# Altium footprint library Connectors.PcbLib: 63 footprints (part 2 of 4)
Each footprint in its own frame and in the unit in brackets; x right, y up, seen from the top. Pads: shape width x height; smd on the part's side, far side on the other; paste and mask are expansions set on the pad; w line width, h text height; cw(c..) or ccw(c..) is an arc to the next point about the centre after c.
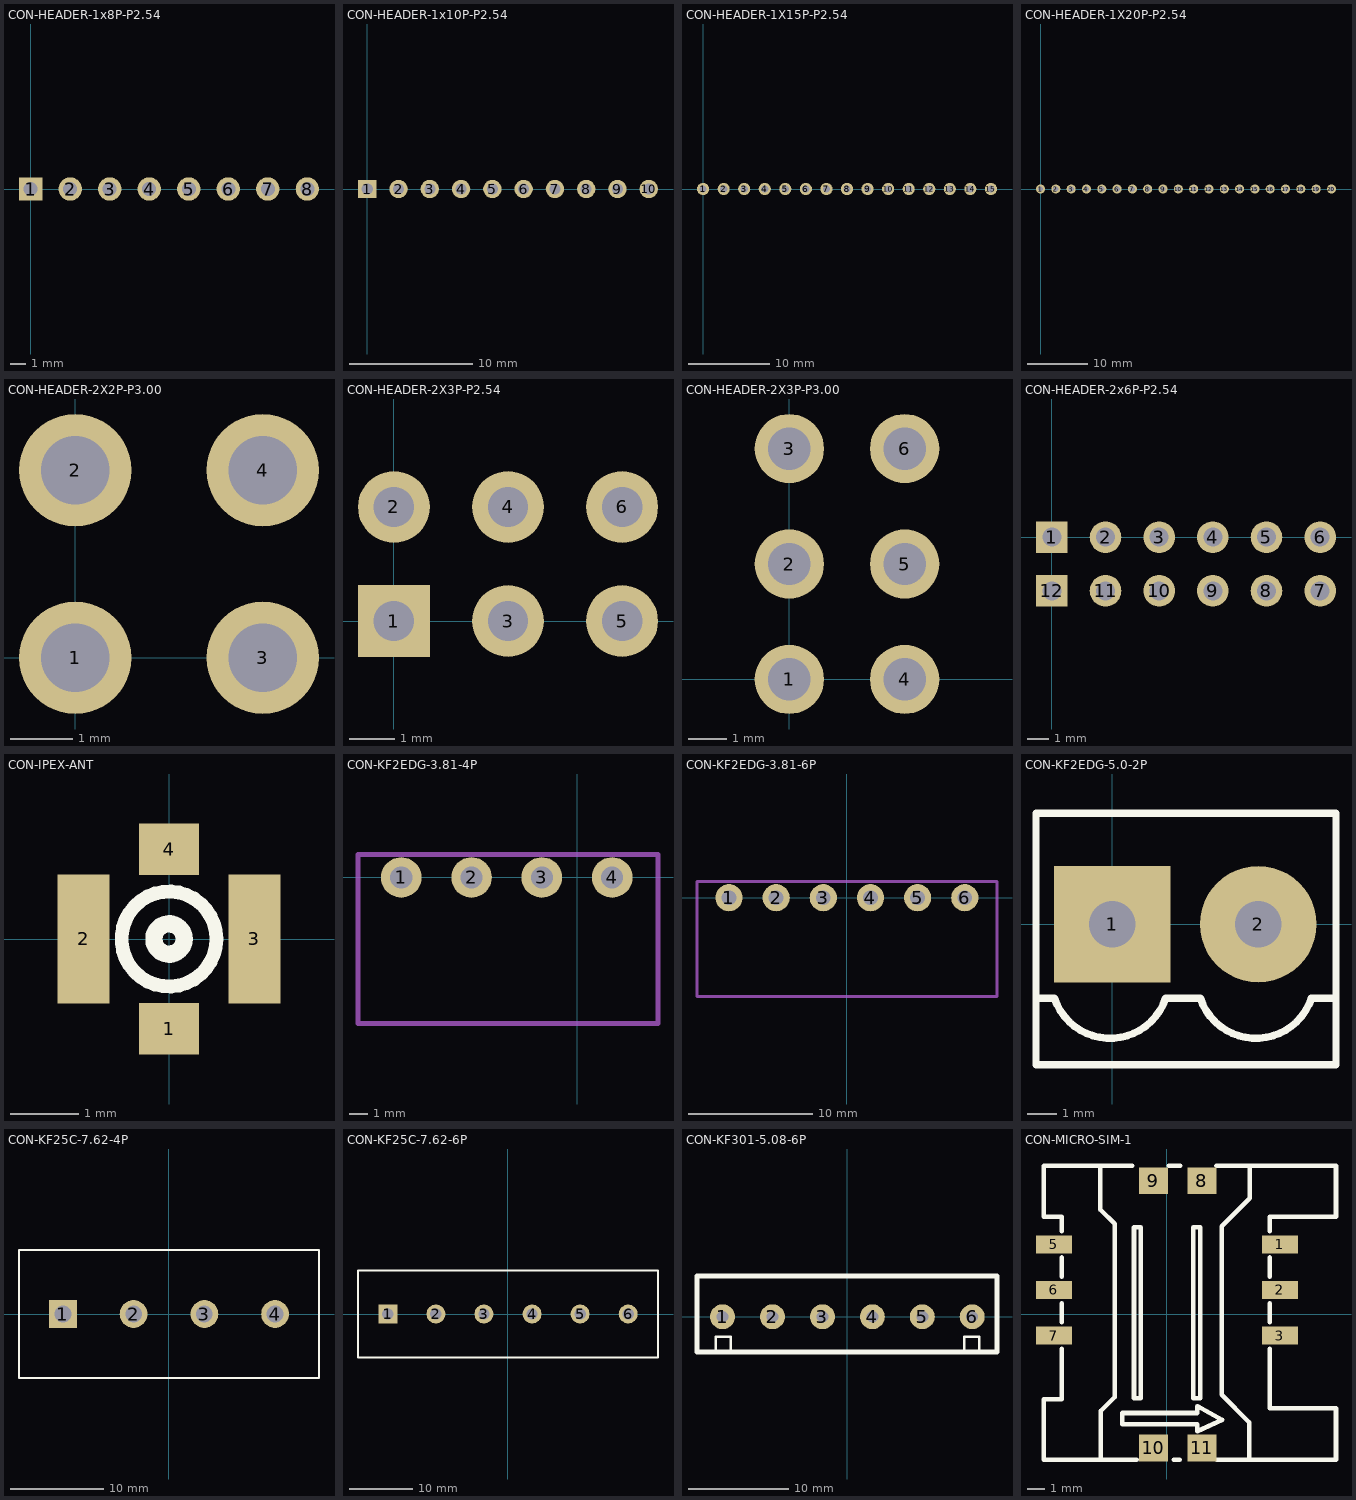
[diagram p1: the footprints below, top view; thin cyan lines are the x and y axes]

## CON-HEADER-1x8P-P2.54 [mm] "CONNECTOR"
pads (8):
  rect 1.5x1.5 hole 0.9: 1(0,0)
  round 1.5 hole 0.9: 2(2.54,0) 3(5.08,0) 4(7.62,0) 5(10.16,0) 6(12.7,0) 7(15.24,0) 8(17.78,0)
3D body "User Library-Pin Header Strip.step": height 8.51, standoff -3.68, extent 3.81,-1.46 8.89,1.46
3D body "User Library-Pin Header Strip.step": height 8.51, standoff -3.68, extent -1.27,-1.46 3.81,1.46
3D body "User Library-Pin Header Strip.step": height 8.51, standoff -3.68, extent 8.89,-1.46 13.97,1.46
3D body "User Library-Pin Header Strip.step": height 8.51, standoff -3.68, extent 13.97,-1.46 19.05,1.46

## CON-HEADER-1x10P-P2.54 [mm] "CONNECTOR"
pads (10):
  rect 1.5x1.5 hole 0.9: 1(0,0)
  round 1.5 hole 0.9: 2(2.54,0) 3(5.08,0) 4(7.62,0) 5(10.16,0) 6(12.7,0) 7(15.24,0) 8(17.78,0) 9(20.32,0) 10(22.86,0)
3D body "User Library-Pin Header Strip.step": height 8.51, standoff -3.68, extent 19.05,-1.46 24.13,1.46
3D body "User Library-Pin Header Strip.step": height 8.51, standoff -3.68, extent 3.81,-1.46 8.89,1.46
3D body "User Library-Pin Header Strip.step": height 8.51, standoff -3.68, extent -1.27,-1.46 3.81,1.46
3D body "User Library-Pin Header Strip.step": height 8.51, standoff -3.68, extent 8.89,-1.46 13.97,1.46
3D body "User Library-Pin Header Strip.step": height 8.51, standoff -3.68, extent 13.97,-1.46 19.05,1.46

## CON-HEADER-1X15P-P2.54 [mm] "CONNECTOR"
pads (15):
  round 1.5 hole 0.9: 1(0,0) 2(2.54,0) 3(5.08,0) 4(7.62,0) 5(10.16,0) 6(12.7,0) 7(15.24,0) 8(17.78,0) 9(20.32,0) 10(22.86,0) 11(25.4,0) 12(27.94,0) 13(30.48,0) 14(33.02,0) 15(35.56,0)
3D body "User Library-Male-Pin Header Strip-1x1-2.54mm.step": height 2.18, standoff -10.01, extent -1.27,-1.46 1.27,1.46
3D body "User Library-Male-Pin Header Strip-1x1-2.54mm.step": height 2.18, standoff -10.01, extent 1.27,-1.46 3.81,1.46
3D body "User Library-Male-Pin Header Strip-1x1-2.54mm.step": height 2.18, standoff -10.01, extent 3.81,-1.46 6.35,1.46
3D body "User Library-Male-Pin Header Strip-1x1-2.54mm.step": height 2.18, standoff -10.01, extent 6.35,-1.46 8.89,1.46
3D body "User Library-Male-Pin Header Strip-1x1-2.54mm.step": height 2.18, standoff -10.01, extent 8.89,-1.46 11.43,1.46
3D body "User Library-Male-Pin Header Strip-1x1-2.54mm.step": height 2.18, standoff -10.01, extent 11.43,-1.46 13.97,1.46
3D body "User Library-Male-Pin Header Strip-1x1-2.54mm.step": height 2.18, standoff -10.01, extent 13.97,-1.46 16.51,1.46
3D body "User Library-Male-Pin Header Strip-1x1-2.54mm.step": height 2.18, standoff -10.01, extent 16.51,-1.46 19.05,1.46
3D body "User Library-Male-Pin Header Strip-1x1-2.54mm.step": height 2.18, standoff -10.01, extent 19.05,-1.46 21.59,1.46
3D body "User Library-Male-Pin Header Strip-1x1-2.54mm.step": height 2.18, standoff -10.01, extent 21.59,-1.46 24.13,1.46
3D body "User Library-Male-Pin Header Strip-1x1-2.54mm.step": height 2.18, standoff -10.01, extent 24.13,-1.46 26.67,1.46
3D body "User Library-Male-Pin Header Strip-1x1-2.54mm.step": height 2.18, standoff -10.01, extent 26.67,-1.46 29.21,1.46
3D body "User Library-Male-Pin Header Strip-1x1-2.54mm.step": height 2.18, standoff -10.01, extent 29.21,-1.46 31.75,1.46
3D body "User Library-Male-Pin Header Strip-1x1-2.54mm.step": height 2.18, standoff -10.01, extent 31.75,-1.46 34.29,1.46
3D body "User Library-Male-Pin Header Strip-1x1-2.54mm.step": height 2.18, standoff -10.01, extent 34.29,-1.46 36.83,1.46

## CON-HEADER-1X20P-P2.54 [mm] "CONNECTOR"
pads (20):
  round 1.5 hole 0.9: 1(0,0) 2(2.54,0) 3(5.08,0) 4(7.62,0) 5(10.16,0) 6(12.7,0) 7(15.24,0) 8(17.78,0) 9(20.32,0) 10(22.86,0) 11(25.4,0) 12(27.94,0) 13(30.48,0) 14(33.02,0) 15(35.56,0) 16(38.1,0) 17(40.64,0) 18(43.18,0) 19(45.72,0) 20(48.26,0)
3D body "User Library-Pin Header Strip.step": height 8.51, standoff -3.68, extent 34.29,-1.46 39.37,1.46
3D body "User Library-Pin Header Strip.step": height 8.51, standoff -3.68, extent 29.21,-1.46 34.29,1.46
3D body "User Library-Pin Header Strip.step": height 8.51, standoff -3.68, extent 44.45,-1.46 49.53,1.46
3D body "User Library-Pin Header Strip.step": height 8.51, standoff -3.68, extent 39.37,-1.46 44.45,1.46
3D body "User Library-Pin Header Strip.step": height 8.51, standoff -3.68, extent 24.13,-1.46 29.21,1.46
3D body "User Library-Pin Header Strip.step": height 8.51, standoff -3.68, extent 19.05,-1.46 24.13,1.46
3D body "User Library-Pin Header Strip.step": height 8.51, standoff -3.68, extent 13.97,-1.46 19.05,1.46
3D body "User Library-Pin Header Strip.step": height 8.51, standoff -3.68, extent 8.89,-1.46 13.97,1.46
3D body "User Library-Pin Header Strip.step": height 8.51, standoff -3.68, extent 3.81,-1.46 8.89,1.46
3D body "User Library-Pin Header Strip.step": height 8.51, standoff -3.68, extent -1.27,-1.46 3.81,1.46

## CON-HEADER-2X2P-P3.00 [mm] "CONNECTOR"
height 10.16
pads (4):
  round 1.8 hole 1.1: 1(0,0) 2(0,3) 3(3,0) 4(3,3)

## CON-HEADER-2X3P-P2.54 [mm] "CONNECTOR"
height 10.16
pads (6):
  rect 1.6x1.6 hole 0.9: 1(0,0)
  round 1.6 hole 0.9: 2(0,2.54) 3(2.54,0) 4(2.54,2.54) 5(5.08,0) 6(5.08,2.54)
3D body "HDR2.54-1x2P.STEP": height 8.5, standoff -3, extent 3.81,-1.27 6.35,3.81
3D body "HDR2.54-1x2P.STEP": height 8.5, standoff -3, extent -1.27,-1.27 1.27,3.81
3D body "HDR2.54-1x2P.STEP": height 8.5, standoff -3, extent 1.27,-1.27 3.81,3.81

## CON-HEADER-2X3P-P3.00 [mm] "CONNECTOR"
height 10.16
pads (6):
  round 1.8 hole 1.1: 1(0,0) 2(0,3) 3(0,6) 4(3,0) 5(3,3) 6(3,6)

## CON-HEADER-2x6P-P2.54 [mm] "CONNECTOR"
pads (12):
  rect 1.5x1.5 hole 0.9: 1(0,0) 12(0,-2.54)
  round 1.5 hole 0.9: 2(2.54,0) 3(5.08,0) 4(7.62,0) 5(10.16,0) 6(12.7,0) 7(12.7,-2.54) 8(10.16,-2.54) 9(7.62,-2.54) 10(5.08,-2.54) 11(2.54,-2.54)
3D body "User Library-Pin Header Strip.step": height 8.51, standoff -3.68, extent -1.27,-4 3.81,-1.08
3D body "User Library-Pin Header Strip.step": height 8.51, standoff -3.68, extent 3.81,-4 8.89,-1.08
3D body "User Library-Pin Header Strip.step": height 8.51, standoff -3.68, extent 8.89,-4 13.97,-1.08
3D body "User Library-Pin Header Strip.step": height 8.51, standoff -3.68, extent 8.89,-1.46 13.97,1.46
3D body "User Library-Pin Header Strip.step": height 8.51, standoff -3.68, extent -1.27,-1.46 3.81,1.46
3D body "User Library-Pin Header Strip.step": height 8.51, standoff -3.68, extent 3.81,-1.46 8.89,1.46

## CON-IPEX-ANT [mil] "Connectors"
pads (4):
  rect 35x30 smd: 1(0.01,-52.16) 4(0.01,52.16)
  rect 30x75 smd: 2(-49.61,0) 3(49.61,0)
Top Overlay:
  circle w8: c0,0 r27.56
  circle w10: c0,0 r8.8
3D body "User Library-IPEX.step": height 49.21, standoff -0.39, extent -59.06,-61.02 59.05,61.03

## CON-KF2EDG-3.81-4P [mm] "KF2EDGR-3.81"
pads (4):
  round 2.2 hole 1.2: 1(-9.525,0) 2(-5.715,0) 3(-1.905,0) 4(1.905,0)
Mechanical 15:
  lines w0.254: -11.87,-7.91 -11.87,1.24 4.39,1.24 4.39,-7.91 -11.87,-7.91
3D body "弯插,P=3.81mm.STEP": height 7.3, standoff -3.4, extent -11.755,-7.923 4.275,1.277

## CON-KF2EDG-3.81-6P [mm] "KF2EDGR-3.81"
pads (6):
  round 2.2 hole 1.2: 1(-9.525,0) 2(-5.715,0) 3(-1.905,0) 4(1.905,0) 5(5.715,0) 6(9.525,0)
Mechanical 15:
  lines w0.254: -12.11,-7.98 -12.11,1.31 12.13,1.31 12.13,-7.98 -12.11,-7.98
3D body "1803316.stp": height 7.25, standoff -3.4, extent -12.125,-8.01 12.125,1.29

## CON-KF2EDG-5.0-2P [mm] "Connectors"
height 1.75
pads (2):
  rect 4x4 hole 1.6: 1(0,0)
  round 4 hole 1.6: 2(5,0)
Top Overlay:
  lines w0.254: -2.62,-2.54 -1.985,-2.54 ccw(c-0.08,-1.905) 1.825,-2.54 3.015,-2.54 ccw(c4.92,-1.905) 6.825,-2.54 7.667,-2.54 ; -2.62,-4.826 7.667,-4.826 7.667,3.81 -2.62,3.81 -2.62,-4.826
3D body "KF2EDGK-1P.STEP": height 11.25, standoff -2.95, extent 2.46,-4.75 7.54,3.75
3D body "KF2EDGK-1P.STEP": height 11.25, standoff -2.95, extent -2.54,-4.75 2.54,3.75

## CON-KF25C-7.62-4P [mm] "Connectors"
pads (4):
  rect 3x3 hole 1.8 mask+0.051: 1(-11.43,0)
  round 3 hole 1.8 mask+0.051: 2(-3.81,0) 3(3.81,0) 4(11.43,0)
Top Overlay:
  lines w0.254: -16.165,-6.9 -16.165,6.9 16.165,6.9 16.165,-6.9 -16.165,-6.9
3D body "插件,P=7.62mm.STEP": height 14.8, standoff -5, extent -16.165,-6.9 16.165,6.9

## CON-KF25C-7.62-6P [mm] "Connectors"
pads (6):
  rect 3x3 hole 1.8 mask+0.051: 1(-19.05,0)
  round 3 hole 1.8 mask+0.051: 2(-11.43,0) 3(-3.81,0) 4(3.81,0) 5(11.43,0) 6(19.05,0)
Top Overlay:
  lines w0.254: -23.785,-6.9 23.785,-6.9 23.785,6.9 -23.785,6.9 -23.785,-6.9
3D body "插件,P=7.62mm.STEP": height 14.8, standoff -5, extent -0.925,-6.9 23.785,6.9
3D body "插件,P=7.62mm.STEP": height 14.8, standoff -5, extent -23.785,-6.9 0.925,6.9

## CON-KF301-5.08-6P [mm] "Connectors"
pads (6):
  round 2.5 hole 1.2 mask+0.051: 1(-12.5,0) 2(-7.5,0) 3(-2.5,0) 4(2.5,0) 5(7.5,0) 6(12.5,0)
Top Overlay:
  lines w0.254: -13.2,-3.51 -13.2,-2.01 -11.7,-2.01 -11.7,-3.51 ; 11.7,-3.51 11.7,-2.01 13.2,-2.01 13.2,-3.51
  lines w0.5: -15.06,-3.51 14.98,-3.51 14.98,4.033 14.98,4.06 -15.06,4.06 -15.06,-3.51
3D body "User Library-Terminal-Screw-3A-3way.step": height 10, standoff -3, extent -15.625,-3.468 -0.025,4.132
3D body "User Library-Terminal-Screw-3A-3way.step": height 10, standoff -3, extent -0.559,-3.468 15.041,4.132

## CON-MICRO-SIM-1 [mm] "SIM Card Socket Connectors"
pads (10):
  rect 2x1 smd: 1(6.3,3.9) 2(6.3,1.36) 3(6.3,-1.18) 5(-6.3,3.9) 6(-6.3,1.36) 7(-6.3,-1.18)
  rect 1.6x1.5 smd: 8(1.95,7.45) 9(-0.75,7.45) 10(-0.75,-7.45) 11(1.95,-7.45)
Top Overlay:
  lines w0.254: -6.876,8.218 -6.876,5.451 -5.876,5.451 -5.876,4.631 ; -6.854,8.29 -1.93,8.29 ; -5.876,-1.911 -5.876,-4.736 -6.876,-4.736 -6.876,-8.11 -1.694,-8.11 ; -5.876,-0.449 -5.876,0.629 ; -5.876,2.091 -5.876,3.169 ; -3.707,8.29 -3.707,5.833 -2.917,5.043 -2.917,-4.609 -3.679,-5.371 -3.679,-8.11 ; 0.096,8.29 0.737,8.29 ; 0.368,-8.11 0.719,-8.11 ; 2.763,8.29 9.424,8.29 9.424,5.452 5.724,5.452 5.724,4.631 ; 2.781,-8.11 9.424,-8.11 9.424,-5.244 5.724,-5.244 5.724,-1.911 ; 4.576,-8.11 4.576,-6.006 3.052,-4.482 3.052,4.916 4.618,6.482 4.618,8.29 ; 5.724,-0.449 5.724,0.629 ; 5.724,2.091 5.724,3.169 ; -2.5,-6.133 1.691,-6.133 1.691,-6.514 3.088,-5.879 1.691,-5.117 1.691,-5.498 -2.5,-5.498 -2.5,-5.625 -2.5,-6.133 ; -1.837,-4.672 -1.456,-4.672 -1.456,4.853 -1.837,4.853 -1.837,-4.672 ; 1.465,-4.672 1.846,-4.672 1.846,4.853 1.465,4.853 1.465,-4.672
3D body "693010020611.stp": height 1.8, standoff 0, extent -6.854,-8.11 9.446,8.29